# Altium schematic symbol library Relay Board.SCHLIB: 5 symbols
Pins are listed as number, name and electrical type; pins without a type are passive.

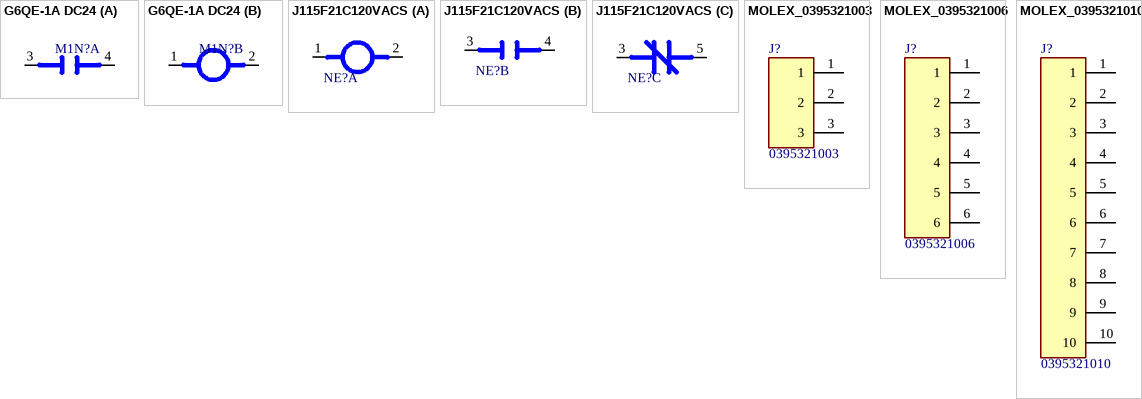
[diagram p0: symbols G6QE-1A DC24 to MOLEX_0395321010]

## G6QE-1A DC24
designator M1N?  (value not drawn)
RELAY PWR PCB SPST-NO 32A 24VDC; Manufacturer: Omron; Copyright: Copyright (C) 2022 Ultra Librarian. All rights reserved.; Manufacturer Part Number: G6QE-1A DC24; Supplier Part Number 1: 653-G6QE-1ADC24; Supplier 1: Mouser; Type: DEV
footprint RELAY_G6QE-1A_OMR
part A pins: 3, 4
part B pins: 1, 2

## J115F21C120VACS
designator NE?  (value not drawn)
RELAY UL & TUV GEN PURP SPDT 40A; Manufacturer: CIT Relay and Switch; Manufacturer Part Number: J115F21C120VACS; Supplier Part Number 1: 2449-J115F21C120VACS-ND; Supplier 1: Digi-Key; Type: DEV
footprint RELAY_J115F2
part A pins: 1 C1, 2 C2
part B pins: 3 COM, 4 NO
part C pins: 3 COM, 5 NC

## MOLEX_0395321003
designator J?, comment 0395321003
TERM BLOCK HDR 3POS 90DEG 5.08MM; Manufacturer: Molex; Manufacturer Part Number: 0395321003; Supplier Part Number 1: WM7846-ND; Package: None; Supplier 1: Digi-Key; Value: 0395321003
footprint HDR1X3_MOLEX_TERMINAL
pins: 1, 2, 3

## MOLEX_0395321006
designator J?, comment 0395321006
TERM BLOCK HDR 6POS 90DEG 5.08MM; Manufacturer: Molex; Manufacturer Part Number: 0395321006; Supplier Part Number 1: 900-0395321006-ND; Package: None; Supplier 1: Digi-Key; Value: 0395321006
footprint HDR1X6_MOLEX_TERMINAL
pins: 1, 2, 3, 4, 5, 6

## MOLEX_0395321010
designator J?, comment 0395321010
TERM BLOCK HDR 10POS 5.08MM; Manufacturer: Molex; Manufacturer Part Number: 0395321010; Supplier Part Number 1: WM7851-ND; Package: None; Supplier 1: Digi-Key; Value: 0395321010
footprint HDR1X10_MOLEX_TERMINAL
pins: 1, 2, 3, 4, 5, 6, 7, 8, 9, 10